# Altium schematic symbol library sch_mp1584.SchLib: 1 symbol
Pins are listed as number, name and electrical type; pins without a type are passive.

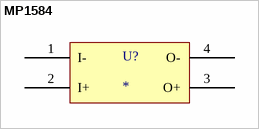
[diagram p0: symbol MP1584]

## MP1584
designator U?
footprint MP1584
pins: 1 I-, 2 I+, 3 O+, 4 O-